# Altium integrated library SMF5.0.IntLib: 1 symbol
Pins are listed as number, name and electrical type; pins without a type are passive.

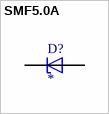
[diagram p0: symbol SMF5.0A]

## SMF5.0A
designator D?
200W, 6.7V, 5%, Unidirectional, TVS; MF: Taiwan Semiconductor; MP: SMF5.0A; SnapEDA_Link: https://www.snapeda.com/parts/SMF5.0A/taiwan/view-part/?ref=snap; Package: SOD-123W-2 Taiwan Semiconductor; Value: *; Check_prices: https://www.snapeda.com/parts/SMF5.0A/taiwan/view-part/?ref=eda
footprint SODFL3718X102N
pins: A, C